# Altium footprint library custom-case.PcbLib: 342 footprints (part 3 of 22)
Each footprint in its own frame and in the unit in brackets; x right, y up, seen from the top. Pads: shape width x height; smd on the part's side, far side on the other; paste and mask are expansions set on the pad; w line width, h text height; cw(c..) or ccw(c..) is an arc to the next point about the centre after c.
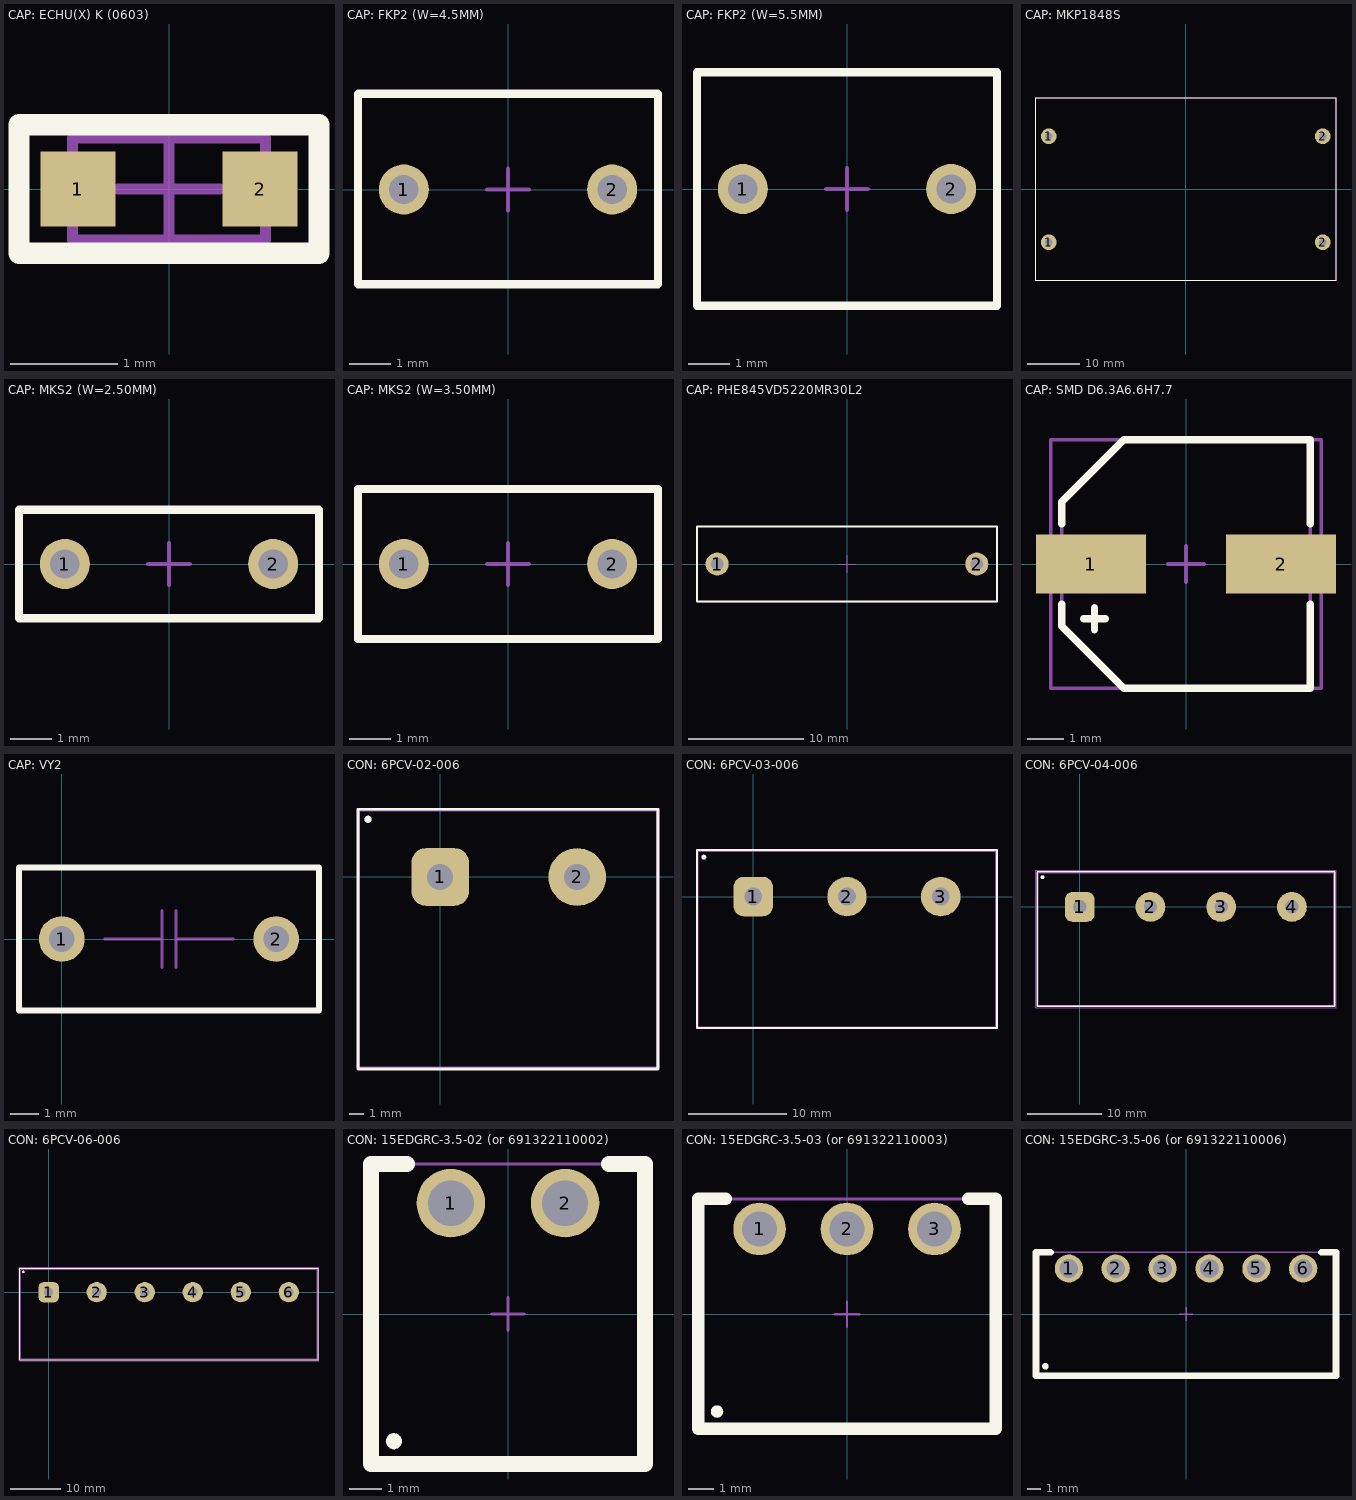
[diagram p2: the footprints below, top view; thin cyan lines are the x and y axes]

## CAP: ECHU(X) K (0603) [mm]
height 0.7
pads (2):
  rect 0.7x0.7 smd: 1(-0.85,0) 2(0.85,0)
Top Overlay:
  lines w0.2: -1.4,-0.6 -1.4,0.6 1.4,0.6 1.4,-0.6 -1.4,-0.6
Top Assy:
  lines w0.1: -0.9,-0.475 0.9,-0.475 0.9,0.475 -0.9,0.475 -0.9,-0.475
Size Area:
  lines w0.1: -0.475,0 0.475,0 ; 0,-0.475 0,0.475 ; -1.4,-0.6 1.4,-0.6 1.4,0.6 -1.4,0.6 -1.4,-0.6
3D body: height 0.7, standoff 0, extent 0.55,-0.475 0.9,0.475
3D body: height 0.7, standoff 0, extent -0.9,-0.475 -0.55,0.475
3D body: height 0.7, standoff 0, extent -0.55,-0.475 0.55,0.475

## CAP: FKP2 (W=4.5MM) [mm]
pads (2):
  round 1.2 hole 0.7: 1(-2.5,0) 2(2.5,0)
Top Overlay:
  lines w0.2: -3.6,-2.275 3.6,-2.275 3.6,2.3 0.5,2.3 -3.6,2.3 -3.6,-2.275
Size Area:
  lines w0.1: -0.5,0 0.5,0 ; 0,-0.5 0,0.5 ; -3.6,-2.275 3.6,-2.275 3.6,2.3 -3.6,2.3 -3.6,-2.275
3D body "FILM_RED_P500L720W450H600PD50.step": height 6, standoff -6.2, extent -3.6,-2.25 3.6,2.25

## CAP: FKP2 (W=5.5MM) [mm]
pads (2):
  round 1.2 hole 0.7: 1(-2.5,0) 2(2.5,0)
Top Overlay:
  lines w0.2: -3.6,-2.8 -3.6,2.8 1,2.8 3.6,2.8 3.6,-2.8 -3.6,-2.8
Size Area:
  lines w0.1: -0.5,0 0.5,0 ; 0,-0.5 0,0.5 ; -3.6,-2.8 3.6,-2.8 3.6,2.8 -3.6,2.8 -3.6,-2.8
3D body "FILM_RED_P500L720W550H700PD50.step": height 7, standoff -6.2, extent -3.6,-2.75 3.6,2.75

## CAP: MKP1848S [mm]
pads (4):
  round 3 hole 1.4: 1(-26.3,-10.2) 1(-26.3,10.1) 2(26.2,-10.2) 2(26.2,10.1)
Top Overlay:
  lines w0.2: -28.75,-17.5 -28.75,17.5 28.75,17.5 28.75,-17.5 -28.75,-17.5
Top Assy:
  lines w0.1: -28.75,-17.5 -28.75,17.5 28.75,17.5 28.75,-17.5 -28.75,-17.5
Size Area:
  lines w0.1: -28.75,-17.5 -28.75,17.5 28.75,17.5 28.75,-17.5 -28.75,-17.5
3D body "mkp18film.STEP": height 18.2, standoff -5.8, extent -28.75,-17.5 28.75,17.5

## CAP: MKS2 (W=2.50MM) [mm]
pads (2):
  round 1.2 hole 0.7: 1(-2.5,0) 2(2.5,0)
Top Overlay:
  lines w0.2: -3.6,-1.3 3.6,-1.3 3.6,1.3 1.5,1.3 -3.6,1.3 -3.6,-1.3
Size Area:
  lines w0.1: -0.5,0 0.5,0 ; 0,-0.5 0,0.5 ; -3.6,-1.3 -3.6,1.3 3.6,1.3 3.6,-1.3 -3.6,-1.3
3D body "FILM_RED_P500L720W250H650PD50.step": height 6.5, standoff -6.2, extent -3.6,-1.25 3.6,1.25

## CAP: MKS2 (W=3.50MM) [mm]
pads (2):
  round 1.2 hole 0.7: 1(-2.5,0) 2(2.5,0)
Top Overlay:
  lines w0.2: -3.6,-1.8 -3.6,1.8 2,1.8 3.6,1.8 3.6,-1.8 2.2,-1.8 -2.8,-1.8 -3.6,-1.8
Size Area:
  lines w0.1: -0.5,0 0.5,0 ; 0,-0.5 0,0.5 ; -3.6,-1.8 3.6,-1.8 3.6,1.8 -3.6,1.8 -3.6,-1.8
3D body "FILM_RED_P500L720W350H850PD50.step": height 8.5, standoff -6.2, extent -3.6,-1.75 3.6,1.75

## CAP: PHE845VD5220MR30L2 [mm]
pads (2):
  round 2 hole 1.1: 1(-11.25,-0.003) 2(11.25,-0.003)
Top Overlay:
  lines w0.2: -13,-3.253 13,-3.253 13,3.253 -13,3.253 -13,-3.253
Top Assy:
  lines w0.1: -13,-3.253 -13,3.253 13,3.253 13,-3.253 -13,-3.253
Size Area:
  lines w0.1: -0.75,-0.003 0.75,-0.003 ; 0,-0.75 0,0.75 ; -13,-3.253 -13,3.253 13,3.253 13,-3.253 -13,-3.253
3D body "���.STEP": height 14.55, standoff -3.95, extent -13,-3.253 13,3.253

## CAP: SMD D6.3A6.6H7.7 [mm]
pads (2):
  rect 3x1.6 smd mask+0.075: 1(-2.6,0) 2(2.6,0)
Top Overlay:
  lines w0.2: -3.4,-1.1 -3.4,-1.7 -1.7,-3.4 3.4,-3.4 3.4,-1.1 ; -3.4,1.1 -3.4,1.7 -1.7,3.4 3.4,3.4 3.4,1.1 ; -2.8,-1.5 -2.2,-1.5 ; -2.5,-1.8 -2.5,-1.2
Top Assy:
  lines w0.1: -2.8,-1.5 -2.2,-1.5 ; -2.5,-1.8 -2.5,-1.7 -2.5,-1.2 ; -3.4,-1.7 -1.7,-3.4 3.4,-3.4 3.4,3.4 -1.7,3.4 -3.4,1.7 -3.4,-1.7
Size Area:
  lines w0.1: -0.5,0 0.5,0 ; 0,-0.5 0,0.5 ; -3.7,-3.4 3.7,-3.4 3.7,3.4 -3.7,3.4 -3.7,-3.4
3D body "User Library-SMD Polymer Aluminum Electrolytic Capacitors C6 39uF 16V.STEP": height 5.9, standoff -0.05, extent -3.65,-3.3 3.65,3.3

## CAP: VY2 [mm]
pads (2):
  round 1.6 hole 0.9: 1(0,0) 2(7.5,0)
Top Overlay:
  lines w0.2: 9,-2.5 -1.5,-2.5 -1.5,2.5 9,2.5 9,-2.5 ; 9,-2.5 9,-2.5
Top Assy:
  lines w0.1: 1.5,0 3.5,0 3.5,1 3.5,-1 ; 4,-1 4,1 4,0 6,0 ; -1.5,-2.5 9,-2.5 9,2.5 -1.5,2.5 -1.5,-2.5
Size Area:
  lines w0.1: -1.5,-2.5 -1.5,-2.5 ; -1.5,-2.5 9,-2.5 9,2.5 -1.5,2.5 -1.5,-2.5
3D body "777.STEP": height 14.75, standoff -1.75, extent -1.5,-2.5 9,2.5

## CON: 6PCV-02-006 [mm]
pads (4):
  rrect50% 4x4 hole 1.8: 1(0,0)
  round 4 hole 1.8: 2(9.5,0)
  round 0.5 on Mech1: ""(-5,4)
  round 0.5 on Top Overlay: ""(-5,4)
Top Overlay:
  lines w0.2: -5.7,-13.3 15.1,-13.3 15.1,4.7 -5.7,4.7 -5.7,-13.3
Top Assy:
  lines w0.1: -5.6,-13.2 15,-13.2 15,4.58 -5.6,4.58 -5.6,-13.2
  text "1" at -0.2,-3.6 h2
  text "2" at 9.2,-3.6 h2
Size Area:
  lines w0.1: -5.7,-13.3 -5.7,4.7 15.1,4.7 15.1,-13.3 -5.7,-13.3
3D body "02.STEP": height 15.96, standoff -4.99, extent -5.6,-13.2 15,4.58

## CON: 6PCV-03-006 [mm]
pads (4):
  rrect50% 4x4 hole 1.8: 1(0,0)
  round 4 hole 1.8: 2(9.5,0) 3(19,0)
  round 0.5 on Top Overlay: ""(-5,4)
Top Overlay:
  lines w0.2: -5.7,-13.3 24.7,-13.3 24.7,4.7 -5.7,4.7 -5.7,-13.3
Top Assy:
  lines w0.1: -5.562,-13.2 24.562,-13.2 24.562,4.58 -5.562,4.58 -5.562,-13.2
  text "3" at 18.8,-3.6 h2
  text "2" at 9.2,-3.6 h2
  text "1" at -0.2,-3.6 h2
Size Area:
  lines w0.1: -5.675,-13.3 24.675,-13.3 24.675,4.675 -5.675,4.675 -5.675,-13.3
3D body "03.STEP": height 15.96, standoff -4.99, extent -5.562,-13.2 24.562,4.58

## CON: 6PCV-04-006 [mm]
pads (6):
  rrect50% 4x4 hole 1.8: 1(0,0)
  round 4 hole 1.8: 2(9.5,0) 3(19,0) 4(28.5,0)
  round 0.5 on Mech1: ""(-5,4)
  round 0.5 on Top Overlay: ""(-5,4)
Top Overlay:
  lines w0.2: -5.7,-13.35 -5.7,4.725 34.25,4.725 34.25,-13.35 -5.7,-13.35
Top Assy:
  lines w0.1: -5.55,-13.2 -5.55,4.58 34.1,4.58 34.1,-13.2 -5.55,-13.2
  text "1" at -0.2,-3.6 h2
  text "2" at 9.2,-3.6 h2
  text "3" at 18.8,-3.6 h2
  text "4" at 28.2,-3.6 h2
Size Area:
  lines w0.1: -5.875,-13.525 -5.875,4.9 34.425,4.9 34.425,-13.525 -5.875,-13.525
3D body "6pcv-04-006.STEP": height 15.96, standoff -4.99, extent -5.525,-13.18 34.125,4.6

## CON: 6PCV-06-006 [mm]
pads (8):
  rrect50% 4x4 hole 1.8: 1(0,0)
  round 4 hole 1.8: 2(9.5,0) 3(19,0) 4(28.5,0) 5(38,0) 6(47.5,0)
  round 0.5 on Mech1: ""(-5,4)
  round 0.5 on Top Overlay: ""(-5,4)
Top Overlay:
  lines w0.2: -5.7,-13.35 53.3,-13.35 53.3,4.725 -5.7,4.725 -5.7,-13.35
Top Assy:
  lines w0.1: -5.55,-13.2 53.15,-13.2 53.15,4.58 -5.55,4.58 -5.55,-13.2
  text "6" at 47.2,-3.5 h2
  text "5" at 37.7,-3.6 h2
  text "4" at 28.2,-3.6 h2
  text "3" at 18.8,-3.6 h2
  text "2" at 9.2,-3.6 h2
  text "1" at -0.2,-3.6 h2
Size Area:
  lines w0.1: -5.875,-13.525 53.475,-13.525 53.475,4.9 -5.875,4.9 -5.875,-13.525
3D body "6pcv-06-006.STEP": height 15.96, standoff -4.99, extent -5.55,-13.2 53.15,4.58

## CON: 15EDGRC-3.5-02 (or 691322110002) [mm] "Horizontal PCB Header, pitch 3.5mm, 02p"
height 7
pads (3):
  round 2.1 hole 1.4: 1(-1.75,3.4) 2(1.75,3.4)
  round 0.5 on Top Overlay: ""(-3.5,-3.9)
Top Overlay:
  lines w0.5: -3.1,4.6 -4.2,4.6 -4.2,-4.6 4.2,-4.6 4.2,4.6 3.1,4.6
3D model:
  lines w0.1: -4.2,-4.6 4.2,-4.6 4.2,4.6 -4.2,4.6 -4.2,-4.6
Size Area:
  lines w0.1: -0.5,0 0.5,0 ; 0,-0.5 0,0.5 ; -4.2,-4.6 4.2,-4.6 4.2,4.6 2.2,4.6 -2.2,4.6 -4.2,4.6 -4.2,-4.6
3D body "691322110002.stp": height 7.3, standoff -3.4, extent -4.2,-4.6 4.2,4.6

## CON: 15EDGRC-3.5-03 (or 691322110003) [mm] "Horizontal PCB Header, pitch 3.5mm, 03p"
height 7
pads (4):
  round 2.1 hole 1.4: 1(-3.5,3.4) 2(0,3.4) 3(3.5,3.4)
  round 0.5 on Top Overlay: ""(-5.2,-3.9)
Top Overlay:
  lines w0.5: -4.85,4.6 -5.95,4.6 -5.95,-4.6 5.95,-4.6 5.95,4.6 4.85,4.6
3D model:
  lines w0.1: -5.95,-4.6 -5.95,4.6 5.95,4.6 5.95,-4.6 -5.95,-4.6
Size Area:
  lines w0.1: -0.5,0 0.5,0 ; 0,-0.5 0,0.5 ; -6,-4.6 -6,4.6 6,4.6 6,-4.6 -6,-4.6
3D body "691322110003.stp": height 7.3, standoff -3.4, extent -5.95,-4.6 5.95,4.6

## CON: 15EDGRC-3.5-06 (or 691322110006) [mm] "Horizontal PCB Header, pitch 3.5mm, 06p"
height 7
pads (7):
  round 2.1 hole 1.4: 1(-8.75,3.4) 2(-5.25,3.4) 3(-1.75,3.4) 4(1.75,3.4) 5(5.25,3.4) 6(8.75,3.4)
  round 0.5 on Top Overlay: ""(-10.5,-3.9)
Top Overlay:
  lines w0.5: -10.1,4.6 -11.2,4.6 -11.2,-4.6 11.2,-4.6 11.2,4.6 10.1,4.6
3D model:
  lines w0.1: -11.2,-4.6 -11.2,4.6 11.2,4.6 11.2,-4.6 -11.2,-4.6
Size Area:
  lines w0.1: -0.5,0 0.5,0 ; 0,-0.5 0,0.5 ; -11.2,-4.6 -11.2,4.6 11.2,4.6 11.2,-4.6 -11.2,-4.6
3D body "691322110006.stp": height 7.3, standoff -3.4, extent -11.2,-4.6 11.2,4.6